# Altium footprint library 2171750001_MOL.PcbLib: 1 footprints
Each footprint in its own frame and in the unit in brackets; x right, y up, seen from the top. Pads: shape width x height; smd on the part's side, far side on the other; paste and mask are expansions set on the pad; w line width, h text height; cw(c..) or ccw(c..) is an arc to the next point about the centre after c.
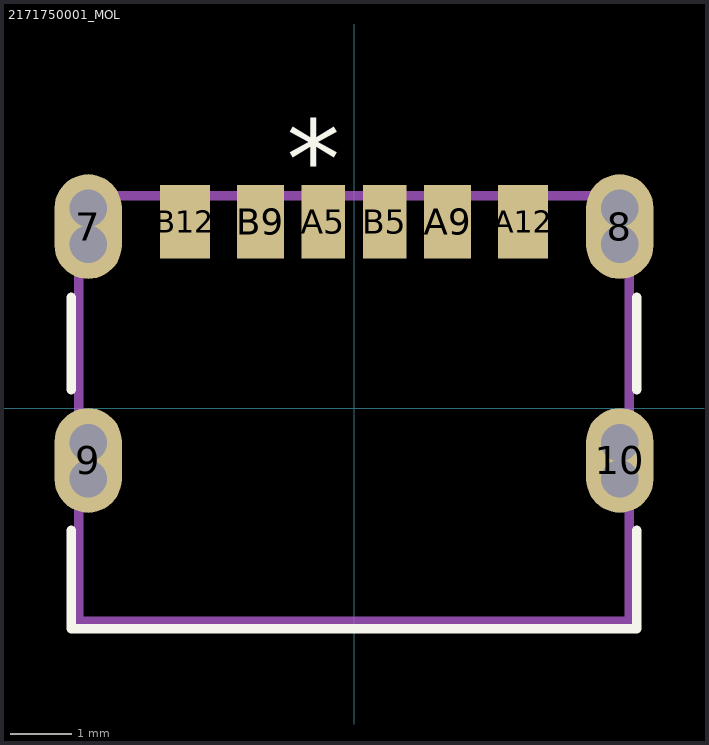
[diagram p0: the footprint, top view; thin cyan lines are the x and y axes]

## 2171750001_MOL [mil]
pads (18):
  oval 43x67 smd: 7(-170.08,116.31) 8(170.08,116.31) 9(-170.08,-33.29) 10(170.08,-33.29)
  rect 28x47 smd: A5(-19.68,119.46) B5(19.68,119.46)
  rect 30x47 smd: A9(59.84,119.46) B9(-59.84,119.46)
  rect 32x47 smd: A12(108.27,119.46) B12(-108.27,119.46)
  round 24 hole 24 unplated: ""(-170,-45) ""(-170,-22) ""(-170,105) ""(-170,128) ""(170,-45) ""(170,-22) ""(170,105) ""(170,128)
Top Overlay:
  lines w6: -181,-78 -181,-141 181,-141 181,-78 ; -181,12 -181,71 ; 181,12 181,71
  text "*" at -43,135 h50
Milling Layer:
  lines w24: -170,-45 -170,-22 ; -170,105 -170,128 ; 170,-45 170,-22 ; 170,105 170,128
Assembly Top:
  lines w6: -176,-136 176,-136 176,136 -176,136 -176,-136
  text "*" at -43,65 h50